# Altium footprint library FootPrintLib_0.PcbLib: 266 footprints (part 4 of 17)
Each footprint in its own frame and in the unit in brackets; x right, y up, seen from the top. Pads: shape width x height; smd on the part's side, far side on the other; paste and mask are expansions set on the pad; w line width, h text height; cw(c..) or ccw(c..) is an arc to the next point about the centre after c.
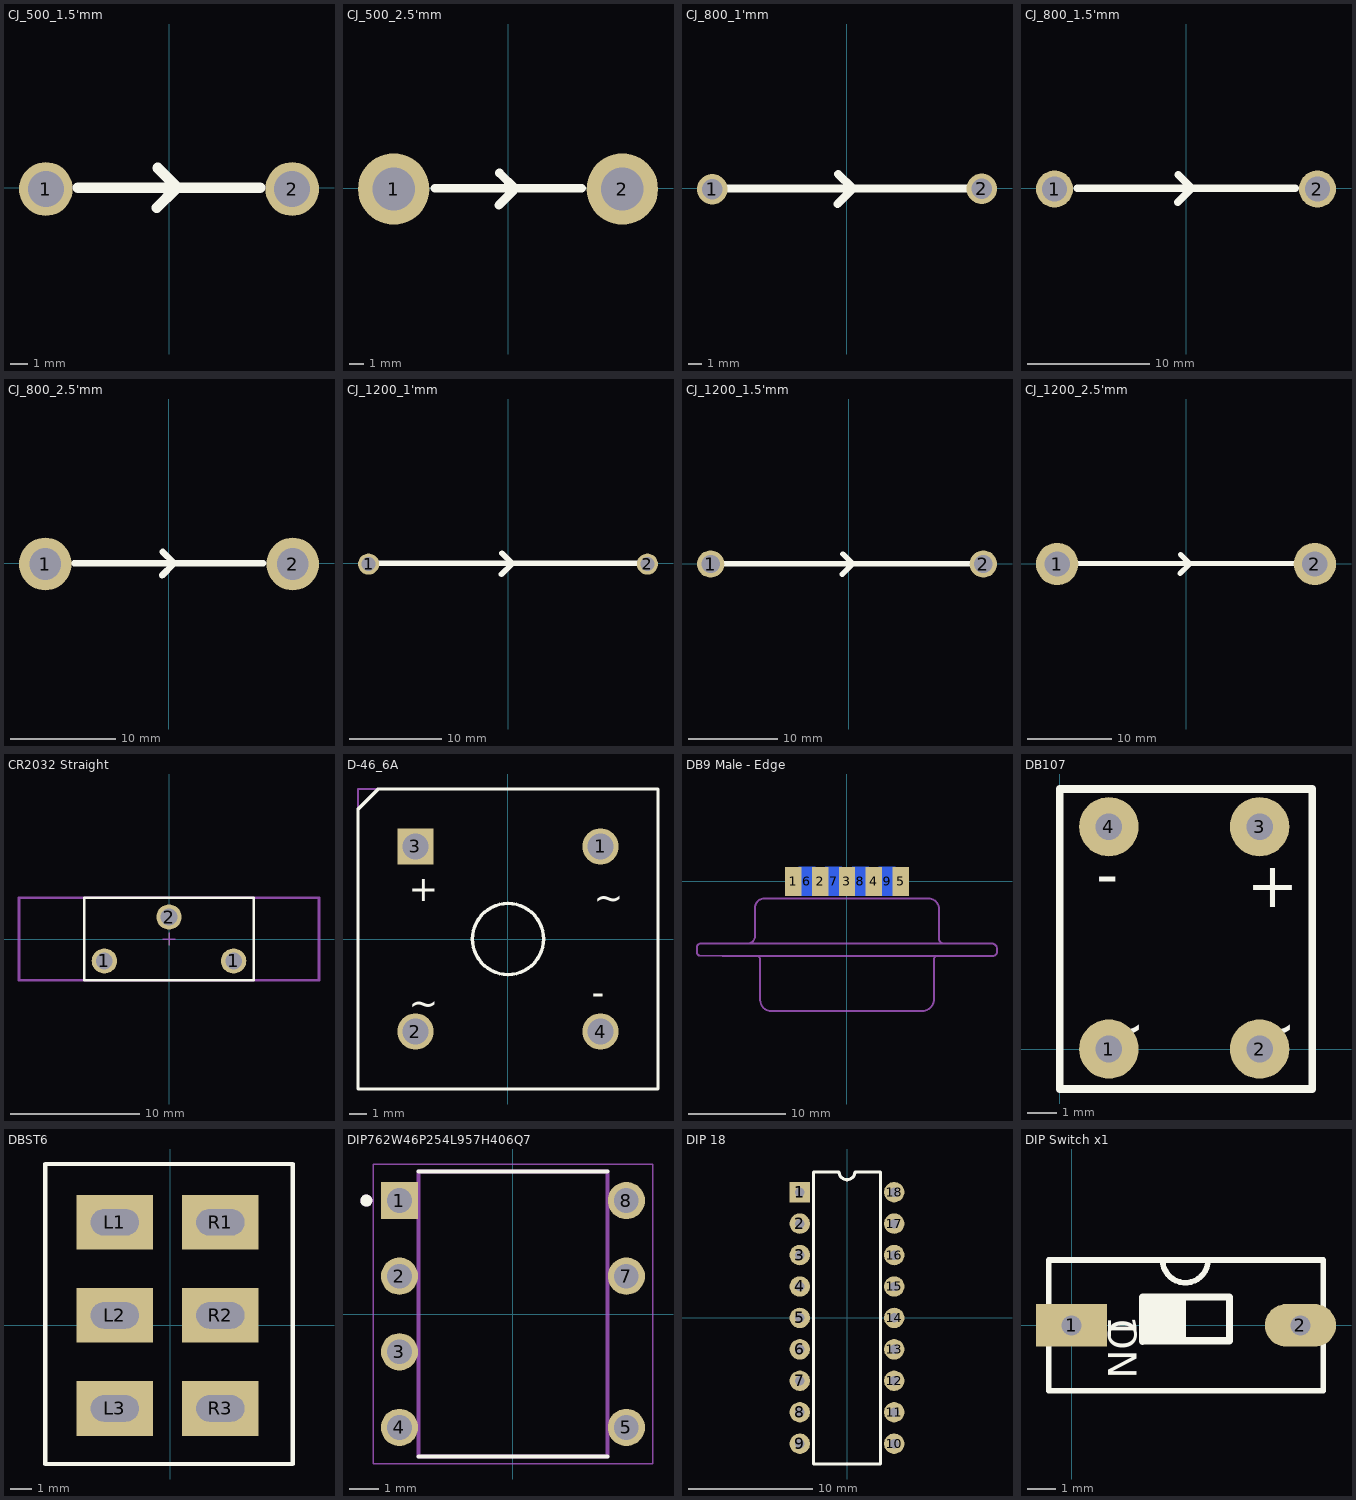
[diagram p3: the footprints below, top view; thin cyan lines are the x and y axes]

## CJ_500_1.5'mm [mil] "12.7 mm (500 mil) Jumper wire"
pads (2):
  round 120 hole 80: 1(-275,-3) 2(275,-3)
Top Overlay:
  lines w10: -26,44 -25,44
  lines w24: -203,0 203,0
  lines w24.02: -27.12,-44.88 14.63,-3.12 ; -25,44 16.76,2.24
3D body: height 795.58, standoff 709.14, extent -250,-42.96 250,43.31
3D body: height 33.46, standoff 5.91, extent 236.36,-13.72 263.78,13.72
3D body: height 33.46, standoff 5.91, extent -263.64,-13.72 -236.22,13.72
3D body: height 795.28, standoff 7.87, extent -317.96,-47.22 -231.69,39.23
3D body: height 795.28, standoff 7.87, extent 233.04,-48.21 319.31,38.23

## CJ_500_2.5'mm [mm] "12.7 mm (500 mil) Jumper wire"
pads (2):
  round 5 hole 3: 1(-8.026,-0.051) 2(8.001,-0.051)
Top Overlay:
  lines w0.61: -5.156,0 5.156,0 ; -0.664,-1.191 0.397,-0.13 ; -0.61,1.067 0.451,0.006
3D body: height 20.2, standoff 17.2, extent -6.35,-1.488 6.65,1.5
3D body: height 20.2, standoff 0.2, extent -9.489,-1.534 -6.501,1.46
3D body: height 20.2, standoff 0.2, extent 6.589,-1.559 9.577,1.435

## CJ_800_1'mm [mil] "20.32 mm (800 mil) Jumper wire"
pads (2):
  round 90 hole 60: 1(-396,-2) 2(398,-1)
Top Overlay:
  lines w24: -353,0 353,0
  lines w24.02: -27.12,-45.88 14.63,-4.12 ; -25,43 16.76,1.24
3D body: height 795.28, standoff 7.87, extent 361.71,-34.78 432.3,35.94
3D body: height 795.28, standoff 7.87, extent -431.08,-38.34 -360.49,32.39
3D body: height 33.46, standoff 5.91, extent -413.64,-13.72 -386.22,13.72
3D body: height 33.46, standoff 5.91, extent 386.36,-13.72 413.78,13.72
3D body: height 795.21, standoff 724.48, extent -400,-35.15 400,35.44

## CJ_800_1.5'mm [mil] "20.32 mm (800 mil) Jumper wire"
pads (2):
  round 120 hole 80: 1(-426,-3) 2(425,-3)
Top Overlay:
  lines w24: -353,0 353,0
  lines w24.02: -27.12,-45.88 14.63,-4.12 ; -25,43 16.76,1.24
3D body: height 795.28, standoff 7.87, extent 382.04,-47.22 468.31,39.23
3D body: height 795.28, standoff 7.87, extent -469.96,-45.22 -383.69,41.23
3D body: height 33.46, standoff 5.91, extent -413.64,-13.72 -386.22,13.72
3D body: height 33.46, standoff 5.91, extent 386.36,-13.72 413.78,13.72
3D body: height 795.58, standoff 709.14, extent -400,-42.96 400,43.31

## CJ_800_2.5'mm [mm] "20.32 mm (800 mil) Jumper wire"
pads (2):
  round 5 hole 3: 1(-11.735,-0.076) 2(11.786,-0.076)
Top Overlay:
  lines w0.61: -8.966,0 8.966,0 ; -0.638,-1.165 0.423,-0.105 ; -0.584,1.092 0.476,0.032
3D body: height 20.2, standoff 0.2, extent 10.323,-1.585 13.311,1.409
3D body: height 20.2, standoff 0.2, extent -13.172,-1.559 -10.184,1.435
3D body: height 20.2, standoff 17.2, extent -10.16,-1.488 10.84,1.5

## CJ_1200_1'mm [mil] "30.48 mm (1200 mil) Jumper wire"
pads (2):
  round 90 hole 60: 1(-594,-3) 2(593,-3)
Top Overlay:
  lines w24: -553,0 553,0
  lines w24.02: -28.12,-45.88 13.63,-4.12 ; -26,43 15.76,1.24
3D body: height 795.21, standoff 724.48, extent -600,-35.15 600,35.44
3D body: height 33.46, standoff 5.91, extent 586.36,-13.83 613.78,13.61
3D body: height 33.46, standoff 5.91, extent -613.64,-13.72 -586.22,13.72
3D body: height 795.28, standoff 7.87, extent -629.29,-37.78 -558.7,32.94
3D body: height 795.28, standoff 7.87, extent 559.71,-37.78 630.3,32.94

## CJ_1200_1.5'mm [mil] "30.48 mm (1200 mil) Jumper wire"
pads (2):
  round 120 hole 80: 1(-606,-1) 2(592,-1)
Top Overlay:
  lines w24: -553,0 553,0
  lines w24.02: -27.12,-45.88 14.63,-4.12 ; -25,43 16.76,1.24
3D body: height 33.46, standoff 5.91, extent -613.64,-13.72 -586.22,13.72
3D body: height 33.46, standoff 5.91, extent 586.36,-13.83 613.78,13.61
3D body: height 795.58, standoff 709.14, extent -600,-42.96 600,43.31
3D body: height 795.28, standoff 7.87, extent -651.96,-41.22 -565.69,45.23
3D body: height 795.28, standoff 7.87, extent 549.04,-42.21 635.31,44.23

## CJ_1200_2.5'mm [mm] "30.48 mm (1200 mil) Jumper wire"
pads (2):
  round 5 hole 3: 1(-15.24,-0.051) 2(15.215,-0.051)
Top Overlay:
  lines w0.61: -14.046,0 14.046,0 ; -0.714,-1.191 0.346,-0.13 ; -0.66,1.067 0.4,0.006
3D body: height 5.2, standoff 2.2, extent -15.24,-1.488 15.24,1.5
3D body: height 0.85, standoff 0.15, extent 14.894,-0.351 15.59,0.346
3D body: height 0.85, standoff 0.15, extent -15.586,-0.349 -14.89,0.349
3D body: height 5.2, standoff 0.2, extent -16.703,-1.559 -13.714,1.435
3D body: height 5.2, standoff 0.2, extent 13.828,-1.61 16.816,1.384

## CR2032 Straight [mm] "Battery Holder"
height 18.1
pads (3):
  round 1.95 hole 1.3: 1(-5,-1.7) 1(5,-1.7) 2(0,1.7)
Top Overlay:
  lines w0.2: -6.55,-3.2 6.55,-3.2 6.55,3.2 -6.55,3.2 -6.55,-3.2
Mechanical 15:
  lines w0.1: -0.5,0 0.5,0 ; 0,-0.5 0,0.5
  lines w0.2: -11.6,-3.2 -11.6,3.2 11.6,3.2 11.6,-3.2 -11.6,-3.2
3D body "CR2032.stp": height 24, standoff 4, extent -9.987,-1.425 10.013,2.075
3D body "79548211.stp": height 18.2, standoff -2.9, extent -11.24,-3.2 11.24,3.2

## D-46_6A [mm] "Bridge Rectifier; 4 Terminals; Body 16.8 x 16.8 mm (typ); Pitch 10.67 mm"
height 6.35
pads (4):
  round 2.1 hole 1.5: 1(5.335,5.335) 2(-5.335,-5.335) 4(5.335,-5.335)
  rect 2.1x2.1 hole 1.5: 3(-5.335,5.335)
Top Overlay:
  circle w0.2: c0,0 r2.05
  lines w0.2: -8.65,-8.65 -8.65,7.474 -7.474,8.65 8.65,8.65 8.65,-8.65 -8.65,-8.65
  text "+" at -5.723,2.167 h1.5
  text "-" at 4.825,-3.809 h1.5
  text "~" at 4.945,1.659 h1.5
  text "~" at -5.723,-4.437 h1.5
Mechanical 13:
  lines w0.1: -8.65,-8.65 8.65,-8.65 8.65,8.65 -8.65,8.65 -8.65,-8.65
3D body "User Library-Diode Bridge D-72.step": height 5.33, standoff -3, extent -8.002,-7.724 7.748,8.026

## DB9 Male - Edge [mm] "Connector; D Subminiature AMPLIMITE 2000; 9 Position; Right Angle"
height 12.75
pads (9):
  rect 1.7x3 smd: 1(-5.54,0) 2(-2.77,0) 3(0,0) 4(2.77,0) 5(5.54,0)
  rect 1.7x3 smd far side: 6(-4.155,0) 7(-1.385,0) 8(1.385,0) 9(4.155,0)
Mechanical 1:
  lines w0.2: -13.259,-6.427 14.984,-6.435 cw(c14.984,-6.95) 15.5,-6.95 15.5,-7.293 cw(c15.091,-7.293) 15.091,-7.702 -12.852,-7.697 ; -12.735,-6.427 -15.113,-6.426 ccw(c-15.113,-6.813) -15.5,-6.813 -15.5,-7.354 ccw(c-15.167,-7.354) -15.167,-7.687 -12.303,-7.697 ; -10.258,-6.422 ccw(c-10.258,-5.665) -9.501,-5.665 ; -9.508,-2.754 cw(c-8.508,-2.754) -8.508,-1.753 ; -9.5,-5.67 -9.5,-2.754 ; -9.293,-7.708 cw(c-9.293,-8.001) -9,-8.001 -8.975,-12.244 ; -8.969,-12.259 ccw(c-7.826,-12.259) -7.826,-13.402 ; -8.484,-1.753 8.357,-1.753 ; -7.798,-13.412 7.722,-13.412 ; 7.759,-13.399 ccw(c7.759,-12.158) 9,-12.158 9,-8.022 ; 8.4,-1.753 cw(c8.4,-2.854) 9.5,-2.854 ; 9,-8.001 cw(c9.293,-8.001) 9.293,-7.708 ; 9.5,-5.891 9.5,-2.854 ; 9.504,-5.916 ccw(c10.012,-5.916) 10.012,-6.424
Mechanical 13:
  text "1" at -5.461,-2.043 h0.8
  text "6" at -4.572,-2.843 h0.8
  text "9" at 3.861,-2.843 h0.8
  text "5" at 5.791,-2.043 h0.8
3D body "CONNECTOR DB_9_MALE.STEP": height 5.45, standoff -7.05, extent -15.102,-13.792 14.898,1.508

## DB107 [mm]
pads (4):
  round 2 hole 0.9: 1(1.651,0) 2(6.731,0) 3(6.731,7.493) 4(1.651,7.493)
Top Overlay:
  lines w0.254: 0,-1.346 0,8.763 8.5,8.763 8.5,-1.346 0,-1.346
  text "~" at 1.143,0 h1.52
  text "~" at 6.223,0 h1.52
  text "-" at 1.219,5.156 h1.52
  text "+" at 6.299,4.775 h1.52
3D body "User Library-Silicon Bridge Rectifiers DF04.step": height 3.45, standoff -3.36, extent 0.152,-0.175 8.352,7.745

## DBST6 [mm] "Double Pole, Single Throw 6Pin"
pads (6):
  rect 3.5x2.5 hole 2.2 slot 1.2 at 90 deg: L1(-2.54,4.699) L2(-2.54,0.445) L3(-2.54,-3.81) R1(2.286,4.699) R2(2.286,0.445) R3(2.286,-3.81)
Top Overlay:
  lines w0.2: -5.715,-6.35 5.588,-6.35 5.588,7.366 -5.715,7.366 -5.715,-6.35
3D body "APEM Series 5000 Toggle Switch (5649agbx408 - 5000 PCB).step": height 31.65, standoff -2.55, extent -6.02,-6.162 5.83,7.128

## DIP762W46P254L957H406Q7 [mm]
pads (7):
  rect 1.25x1.25 hole 0.83: 1(-3.81,3.81)
  round 1.25 hole 0.83: 2(-3.81,1.27) 3(-3.81,-1.27) 4(-3.81,-3.81) 5(3.81,-3.81) 7(3.81,1.27) 8(3.81,3.81)
Top Overlay:
  circle w0.2: c-4.92,3.81 r0.1
  lines w0.127: -3.175,-4.788 3.175,-4.788 ; -3.175,4.788 3.175,4.788
Mechanical 13:
  circle w0.2: c-4.92,3.81 r0.1
  lines w0.127: -3.175,-4.788 3.175,-4.788 3.175,4.788 -3.175,4.788 -3.175,-4.788
Mechanical 15:
  lines w0.05: -4.69,-5.038 4.69,-5.038 4.69,5.038 -4.69,5.038 -4.69,-5.038

## DIP 18 [mil]
pads (18):
  rect 65x65 hole 30: 1(-150,400)
  round 65 hole 30: 2(-150,300) 3(-150,200) 4(-150,100) 5(-150,0) 6(-150,-100) 7(-150,-200) 8(-150,-300) 9(-150,-400) 10(150,-400) 11(150,-300) 12(150,-200) 13(150,-100) 14(150,0) 15(150,100) 16(150,200) 17(150,300) 18(150,400)
Top Overlay:
  lines w10: -106.3,-464.57 106.3,-464.57 106.3,464.57 25,464.57 cw(c0,464.57) -25,464.57 -106.3,464.57 -106.3,-464.57
3D body "PIC18F1320I_P.stp": height 210, standoff -137.8, extent -156.75,-449 166.75,451

## DIP Switch x1 [mm]
height 6.5
pads (2):
  rect 2.5x1.5 hole 0.7: 1(0,0)
  oval 2.5x1.5 hole 0.7: 2(8.05,0)
Top Overlay:
  rectangle: 2.5,-0.556 4.025,1
  lines w0.2: 3.202,2.3 ccw(c4.002,2.3) 4.802,2.3 ; -0.8,-2.3 8.85,-2.3 8.85,2.3 -0.8,2.3 -0.8,-2.3
  lines w0.25: 2.53,-0.54 5.55,-0.54
  lines w0.254: 2.5,-0.556 2.5,1 5.55,1 5.55,-0.54
  text "1" at 1.295,0.33 h1
  text "ON" at 1.295,0.22 h1
3D body "User Library-DS1040-01 (DIP_switch).step": height 6.9, standoff -3.75, extent -0.94,-1.993 8.96,2.007